# Altium integrated library NetTie.IntLib: 1 symbol
Pins are listed as number, name and electrical type; pins without a type are passive.

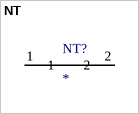
[diagram p0: symbol NT]

## NT
designator NT?  (net tie, no BOM)
footprint NetTie
pins: 1, 2